# Altium integrated library 1935190.IntLib: 1 symbol
Pins are listed as number, name and electrical type; pins without a type are passive.

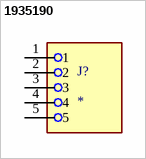
[diagram p0: symbol 1935190]

## 1935190
designator J?
PCB Terminal Screw 5mm 16AWG 400V 17.5A 5 Position COMBICON PT Series | Phoenix Contact 1935190; SnapEDA_Link: https://www.snapeda.com/parts/1935190/Phoenix+Contact/view-part/?ref=snap; Package: None; Value: *; MF: Phoenix Contact; MP: 1935190; Check_prices: https://www.snapeda.com/parts/1935190/Phoenix+Contact/view-part/?ref=eda
footprint PHOENIX_1935190
pins: 1, 2, 3, 4, 5